# Altium schematic symbol library XTAL - ABM8-25.000MHZ-10-D1G-T.SchLib: 1 symbol
Pins are listed as number, name and electrical type; pins without a type are passive.

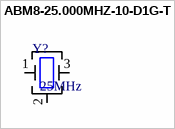
[diagram p0: symbol ABM8-25.000MHZ-10-D1G-T]

## ABM8-25.000MHZ-10-D1G-T
designator Y?, comment 25MHz
25 MHz ±10ppm Crystal 10pF 50 Ohms 4-SMD, No Lead; Manufacturer: Abracon LLC; Manufacturer Part Number: ABM8-25.000MHZ-10-D1G-T; Supplier 1: DigiKey; Supplier Part Number 1: 535-13468-1-ND; Supplier 2: LCSC; Supplier Part Number 2: C5366868; Category: Crystals; Case/Package: 4-SMD, No Lead; Supplier Device Package: 4-SMD (3.2x2.5); Operating Temperature: -40°C ~ 85°C; Lifecycle Status: Active; ComponentLink1Description: Datasheet; ComponentLink1URL: https://mm.digikey.com/Volume0/opasdata/d220001/medias/docus/6536/ABM8_Datasheet.pdf; ComponentLink2Description: DigiKey; ComponentLink2URL: https://www.digikey.com/en/products/result?keywords=ABM8-25.000MHZ-10-D1G-T
footprint ABM8 - ABRACON (Huella ABM8 - ABRACON)
pins: 1, 2 G, 3, 4 G